# Altium schematic symbol library STM32H562RIT6.SchLib: 1 symbol
Pins are listed as number, name and electrical type; pins without a type are passive.

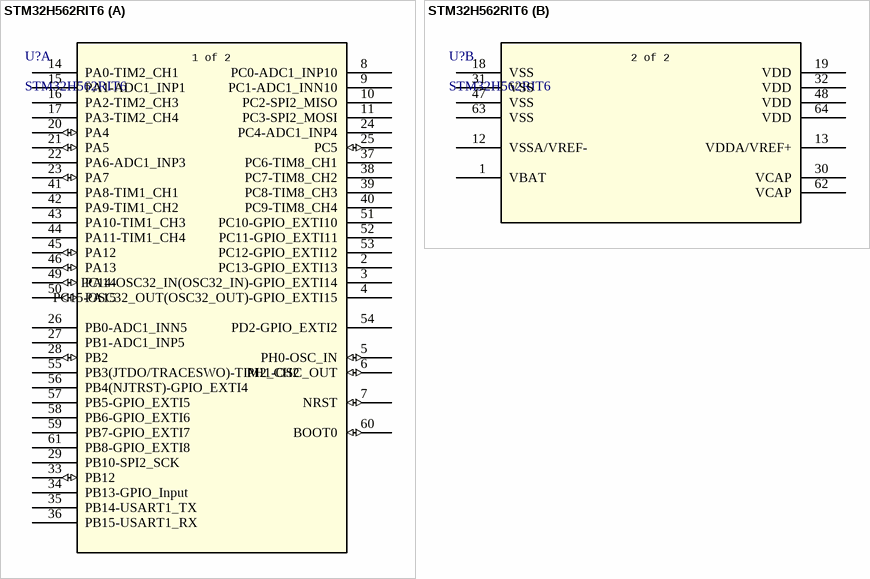
[diagram p0: symbol STM32H562RIT6]

## STM32H562RIT6
designator U?
High-performance, Arm Cortex-M33 with TrustZone, MCU with 2-Mbyte Flash, 640-Kbyte RAM, 250 MHz CPU; Manufacturer_Name: STMicroelectronics; Copyright: Copyright (C) 2025 Ultra Librarian. All rights reserved.; Manufacturer_Part_Number: STM32H562RIT6; Datasheet: https://www.st.com/resource/en/datasheet/stm32h562ag.pdf; RefDes: RefDes; Type: Type
footprint LQFP64-10x10mm_STM
part A pins: 2 PC13-GPIO_EXTI13, 3 PC14-OSC32_IN(OSC32_IN)-GPIO_EXTI14, 4 PC15-OSC32_OUT(OSC32_OUT)-GPIO_EXTI15, 5 PH0-OSC_IN (io), 6 PH1-OSC_OUT (io), 7 NRST (io), 8 PC0-ADC1_INP10, 9 PC1-ADC1_INN10, 10 PC2-SPI2_MISO, 11 PC3-SPI2_MOSI, 14 PA0-TIM2_CH1, 15 PA1-ADC1_INP1, 16 PA2-TIM2_CH3, 17 PA3-TIM2_CH4, 20 PA4 (io), 21 PA5 (io), 22 PA6-ADC1_INP3, 23 PA7 (io), 24 PC4-ADC1_INP4, 25 PC5 (io), 26 PB0-ADC1_INN5, 27 PB1-ADC1_INP5, 28 PB2 (io), 29 PB10-SPI2_SCK, 33 PB12 (io), 34 PB13-GPIO_Input, 35 PB14-USART1_TX, 36 PB15-USART1_RX, 37 PC6-TIM8_CH1, 38 PC7-TIM8_CH2, 39 PC8-TIM8_CH3, 40 PC9-TIM8_CH4, 41 PA8-TIM1_CH1, 42 PA9-TIM1_CH2, 43 PA10-TIM1_CH3, 44 PA11-TIM1_CH4, 45 PA12 (io), 46 PA13 (io), 49 PA14 (io), 50 PA15 (io), 51 PC10-GPIO_EXTI10, 52 PC11-GPIO_EXTI11, 53 PC12-GPIO_EXTI12, 54 PD2-GPIO_EXTI2, 55 PB3(JTDO/TRACESWO)-TIM2_CH2, 56 PB4(NJTRST)-GPIO_EXTI4, 57 PB5-GPIO_EXTI5, 58 PB6-GPIO_EXTI6, 59 PB7-GPIO_EXTI7, 60 BOOT0 (io), 61 PB8-GPIO_EXTI8
part B pins: 1 VBAT (power), 12 VSSA/VREF- (power), 13 VDDA/VREF+ (power), 18 VSS (power), 19 VDD (power), 30 VCAP (power), 31 VSS (power), 32 VDD (power), 47 VSS (power), 48 VDD (power), 62 VCAP (power), 63 VSS (power), 64 VDD (power)
part A text: 1 of 2
part B text: 2 of 2